# Altium schematic symbol library VL53L9CX.SchLib: 1 symbol
Pins are listed as number, name and electrical type; pins without a type are passive.

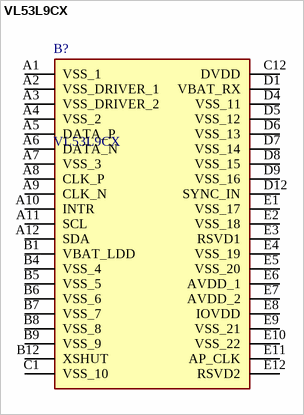
[diagram p0: symbol VL53L9CX]

## VL53L9CX
designator B?
High-Performance 2.3K-Zone 3D All-in-One LiDAR dToF Sensor, -30C to +70C, 12.8 x 6.1 x 4.6 mm, 1.2 V & 3.3 V, Up to 100 Hz frame rate, 3D room mapping (multizone and multiobject detection), Dual camera stereoscopy assistance thanks to 2D and depth multizone distance measurement at 60 fps; Manufacturer_Name: STMicroelectronics; Geometry.Height: 4.7mm; Manufacturer_Part_Number: VL53L9CX; Mouser Part Number: *; Mouser Price/Stock: *; Arrow Part Number: *; Arrow Price/Stock: *; Datasheet Link: https://www.st.com/resource/en/datasheet/vl53l9cx.pdf
footprint VL53L9CX
pins: A1 VSS_1, A2 VSS_DRIVER_1, A3 VSS_DRIVER_2, A4 VSS_2, A5 DATA_P, A6 DATA_N, A7 VSS_3, A8 CLK_P, A9 CLK_N, A10 INTR, A11 SCL, A12 SDA, B1 VBAT_LDD, B4 VSS_4, B5 VSS_5, B6 VSS_6, B7 VSS_7, B8 VSS_8, B9 VSS_9, B12 XSHUT, C1 VSS_10, C12 DVDD, D1 VBAT_RX, D4 VSS_11, D5 VSS_12, D6 VSS_13, D7 VSS_14, D8 VSS_15, D9 VSS_16, D12 SYNC_IN, E1 VSS_17, E2 VSS_18, E3 RSVD1, E4 VSS_19, E5 VSS_20, E6 AVDD_1, E7 AVDD_2, E8 IOVDD, E9 VSS_21, E10 VSS_22, E11 AP_CLK, E12 RSVD2